# Altium footprint library BAT_1121.PcbLib: 1 footprints
Each footprint in its own frame and in the unit in brackets; x right, y up, seen from the top. Pads: shape width x height; smd on the part's side, far side on the other; paste and mask are expansions set on the pad; w line width, h text height; cw(c..) or ccw(c..) is an arc to the next point about the centre after c.
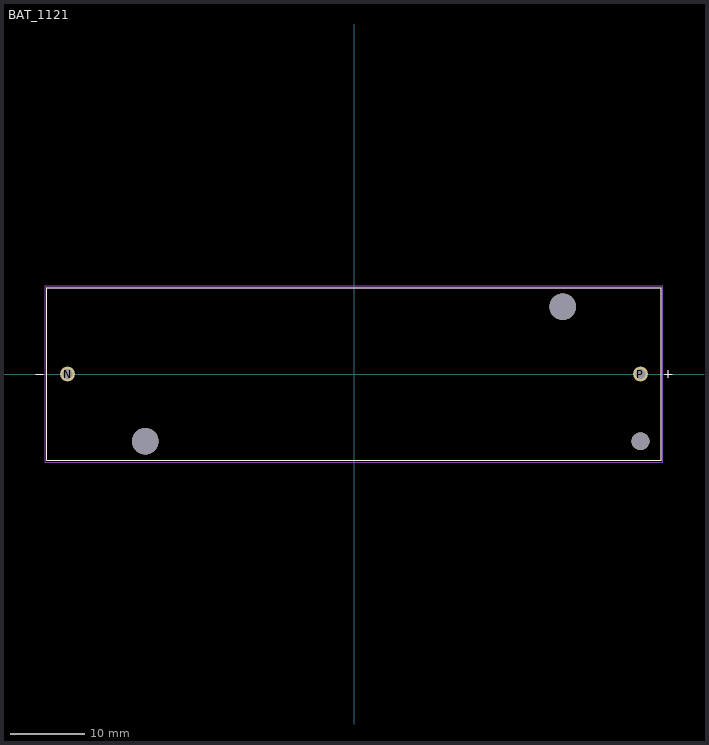
[diagram p0: the footprint, top view; thin cyan lines are the x and y axes]

## BAT_1121 [mm]
height 17.52
pads (5):
  round 1.98 hole 1.32: N(-38.33,0) P(38.33,0)
  round 3.55 hole 3.55 unplated: ""(-27.925,-9) ""(27.925,9)
  round 2.39 hole 2.39 unplated: ""(38.33,-9)
Top Overlay:
  lines w0.127: -42.575,0 -41.575,0 ; 41.575,0 42.575,0 ; 42.075,-0.5 42.075,0.5 ; -41.095,-11.53 41.095,-11.53 41.095,11.53 -41.095,11.53 -41.095,-11.53
Assembly Top:
  lines w0.127: -42.575,0 -41.575,0 ; 41.575,0 42.575,0 ; 42.075,-0.5 42.075,0.5 ; -41.095,-11.53 -41.095,11.53 41.095,11.53 41.095,-11.53 -41.095,-11.53
Courtyard Top:
  lines w0.05: -41.345,-11.78 -41.345,11.78 41.345,11.78 41.345,-11.78 -41.345,-11.78
3D body "step_temp.STEP": height 17.28, standoff -3.69, extent -41.224,-11.586 40.97,11.687